# Altium footprint library FPC.PcbLib: 104 footprints (part 4 of 7)
Each footprint in its own frame and in the unit in brackets; x right, y up, seen from the top. Pads: shape width x height; smd on the part's side, far side on the other; paste and mask are expansions set on the pad; w line width, h text height; cw(c..) or ccw(c..) is an arc to the next point about the centre after c.
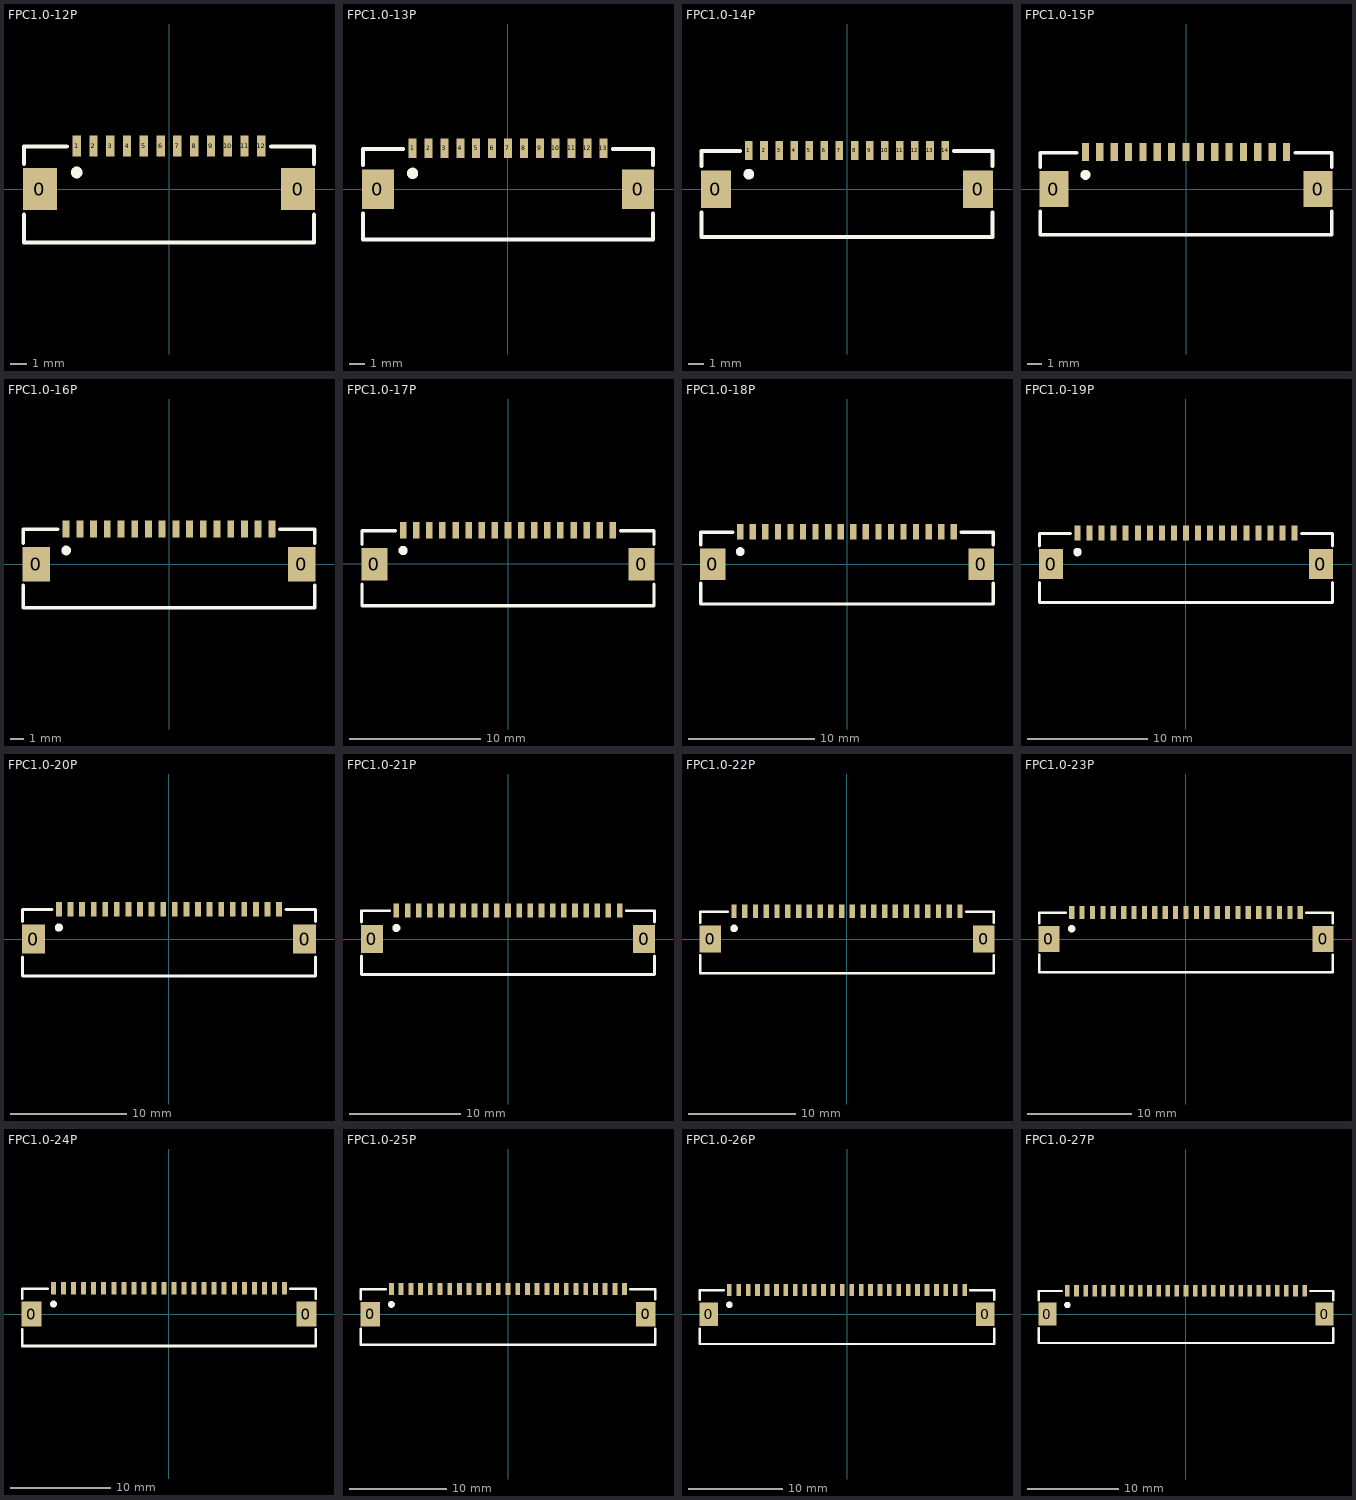
[diagram p3: the footprints below, top view; thin cyan lines are the x and y axes]

## FPC1.0-12P [mm]
pads (14):
  rect 2x2.5 smd: 0(-7.69,0) 0(7.69,0)
  rect 0.5x1.25 smd: 1(-5.5,2.575) 2(-4.5,2.575) 3(-3.5,2.575) 4(-2.5,2.575) 5(-1.5,2.575) 6(-0.5,2.575) 7(0.5,2.575) 8(1.5,2.575) 9(2.5,2.575) 10(3.5,2.575) 11(4.5,2.575) 12(5.5,2.575)
Top Overlay:
  circle w0.5: c-5.5,1 r0.1
  lines w0.254: -8.636,-1.524 -8.636,-3.175 8.636,-3.175 8.636,-1.524 ; -8.636,1.524 -8.636,2.54 -6.096,2.54 ; 6.096,2.54 8.636,2.54 8.636,1.524
3D body "FPC1.0-12P.STEP": height 2, standoff -0.01, extent -8.45,-3 8.45,3

## FPC1.0-13P [mm]
pads (15):
  rect 2x2.5 smd: 0(-8.19,0) 0(8.19,0)
  rect 0.5x1.25 smd: 1(-6,2.575) 2(-5,2.575) 3(-4,2.575) 4(-3,2.575) 5(-2,2.575) 6(-1,2.575) 7(0,2.575) 8(1,2.575) 9(2,2.575) 10(3,2.575) 11(4,2.575) 12(5,2.575) 13(6,2.575)
Top Overlay:
  circle w0.5: c-6,1 r0.1
  lines w0.254: -9.136,-1.524 -9.136,-3.175 9.136,-3.175 9.136,-1.524 ; -9.136,1.524 -9.136,2.54 -6.596,2.54 ; 6.596,2.54 9.136,2.54 9.136,1.524
3D body "FPC1.0-13P.STEP": height 2, standoff -0.01, extent -8.95,-3.175 8.95,2.825

## FPC1.0-14P [mm]
pads (16):
  rect 2x2.5 smd: 0(-8.69,0) 0(8.69,0)
  rect 0.5x1.25 smd: 1(-6.5,2.575) 2(-5.5,2.575) 3(-4.5,2.575) 4(-3.5,2.575) 5(-2.5,2.575) 6(-1.5,2.575) 7(-0.5,2.575) 8(0.5,2.575) 9(1.5,2.575) 10(2.5,2.575) 11(3.5,2.575) 12(4.5,2.575) 13(5.5,2.575) 14(6.5,2.575)
Top Overlay:
  circle w0.5: c-6.5,1 r0.1
  lines w0.254: -9.636,-1.524 -9.636,-3.175 9.636,-3.175 9.636,-1.524 ; -9.636,1.524 -9.636,2.54 -7.096,2.54 ; 7.096,2.54 9.636,2.54 9.636,1.524
3D body "FPC1.0-14P.STEP": height 2, standoff -0.01, extent -9.45,-3 9.45,3

## FPC1.0-15P [mm]
pads (17):
  rect 2x2.5 smd: 0(-9.19,0) 0(9.19,0)
  rect 0.5x1.25 smd: 1(-7,2.575) 2(-6,2.575) 3(-5,2.575) 4(-4,2.575) 5(-3,2.575) 6(-2,2.575) 7(-1,2.575) 8(0,2.575) 9(1,2.575) 10(2,2.575) 11(3,2.575) 12(4,2.575) 13(5,2.575) 14(6,2.575) 15(7,2.575)
Top Overlay:
  circle w0.5: c-7,1 r0.1
  lines w0.254: -10.136,-1.524 -10.136,-3.175 10.136,-3.175 10.136,-1.524 ; -10.136,1.524 -10.136,2.54 -7.596,2.54 ; 7.596,2.54 10.136,2.54 10.136,1.524
3D body "FPC1.0-15P.STEP": height 2, standoff -0.01, extent -9.95,-3 9.95,3

## FPC1.0-16P [mm]
pads (18):
  rect 2x2.5 smd: 0(-9.69,0) 0(9.69,0)
  rect 0.5x1.25 smd: 1(-7.5,2.575) 2(-6.5,2.575) 3(-5.5,2.575) 4(-4.5,2.575) 5(-3.5,2.575) 6(-2.5,2.575) 7(-1.5,2.575) 8(-0.5,2.575) 9(0.5,2.575) 10(1.5,2.575) 11(2.5,2.575) 12(3.5,2.575) 13(4.5,2.575) 14(5.5,2.575) 15(6.5,2.575) 16(7.5,2.575)
Top Overlay:
  circle w0.5: c-7.5,1 r0.1
  lines w0.254: -10.636,-1.524 -10.636,-3.175 10.634,-3.175 10.634,-1.524 ; -10.636,1.524 -10.636,2.54 -8.096,2.54 ; 8.094,2.54 10.634,2.54 10.634,1.524
3D body "FPC1.0-16P.STEP": height 2, standoff -0.01, extent -10.45,-3 10.45,3

## FPC1.0-17P [mm]
pads (19):
  rect 2x2.5 smd: 0(-10.19,-0.04) 0(10.19,-0.04)
  rect 0.5x1.25 smd: 1(-8,2.535) 2(-7,2.535) 3(-6,2.535) 4(-5,2.535) 5(-4,2.535) 6(-3,2.535) 7(-2,2.535) 8(-1,2.535) 9(0,2.535) 10(1,2.535) 11(2,2.535) 12(3,2.535) 13(4,2.535) 14(5,2.535) 15(6,2.535) 16(7,2.535) 17(8,2.535)
Top Overlay:
  circle w0.5: c-8,1 r0.1
  lines w0.254: -11.136,-1.564 -11.136,-3.215 11.134,-3.215 11.134,-1.564 ; -11.136,1.484 -11.136,2.5 -8.596,2.5 ; 8.594,2.5 11.134,2.5 11.134,1.484
3D body "FPC1.0-17P.STEP": height 2, standoff -0.01, extent -11,-3 10.9,3

## FPC1.0-18P [mm]
pads (20):
  rect 2x2.5 smd: 0(-10.69,0) 0(10.69,0)
  rect 0.5x1.25 smd: 1(-8.5,2.575) 2(-7.5,2.575) 3(-6.5,2.575) 4(-5.5,2.575) 5(-4.5,2.575) 6(-3.5,2.575) 7(-2.5,2.575) 8(-1.5,2.575) 9(-0.5,2.575) 10(0.5,2.575) 11(1.5,2.575) 12(2.5,2.575) 13(3.5,2.575) 14(4.5,2.575) 15(5.5,2.575) 16(6.5,2.575) 17(7.5,2.575) 18(8.5,2.575)
Top Overlay:
  circle w0.5: c-8.5,1 r0.1
  lines w0.254: -11.636,-1.524 -11.636,-3.175 11.634,-3.175 11.634,-1.524 ; -11.636,1.524 -11.636,2.54 -9.096,2.54 ; 9.094,2.54 11.634,2.54 11.634,1.524
3D body "FPC1.0-18P.STEP": height 2, standoff -0.01, extent -11.45,-3 11.45,3

## FPC1.0-19P [mm]
pads (21):
  rect 2x2.5 smd: 0(-11.19,0) 0(11.19,0)
  rect 0.5x1.25 smd: 1(-9,2.575) 2(-8,2.575) 3(-7,2.575) 4(-6,2.575) 5(-5,2.575) 6(-4,2.575) 7(-3,2.575) 8(-2,2.575) 9(-1,2.575) 10(0,2.575) 11(1,2.575) 12(2,2.575) 13(3,2.575) 14(4,2.575) 15(5,2.575) 16(6,2.575) 17(7,2.575) 18(8,2.575) 19(9,2.575)
Top Overlay:
  circle w0.5: c-9,1 r0.1
  lines w0.254: -12.136,-1.524 -12.136,-3.175 12.134,-3.175 12.134,-1.524 ; -12.136,1.524 -12.136,2.54 -9.596,2.54 ; 9.594,2.54 12.134,2.54 12.134,1.524
3D body "FPC1.0-19P.STEP": height 2, standoff -0.01, extent -11.95,-3 11.95,3

## FPC1.0-20P [mm]
pads (22):
  rect 2x2.5 smd: 0(-11.69,0) 0(11.69,0)
  rect 0.5x1.25 smd: 1(-9.5,2.575) 2(-8.5,2.575) 3(-7.5,2.575) 4(-6.5,2.575) 5(-5.5,2.575) 6(-4.5,2.575) 7(-3.5,2.575) 8(-2.5,2.575) 9(-1.5,2.575) 10(-0.5,2.575) 11(0.5,2.575) 12(1.5,2.575) 13(2.5,2.575) 14(3.5,2.575) 15(4.5,2.575) 16(5.5,2.575) 17(6.5,2.575) 18(7.5,2.575) 19(8.5,2.575) 20(9.5,2.575)
Top Overlay:
  circle w0.5: c-9.5,1 r0.1
  lines w0.254: -12.636,-1.524 -12.636,-3.175 12.634,-3.175 12.634,-1.524 ; -12.636,1.524 -12.636,2.54 -10.096,2.54 ; 10.094,2.54 12.634,2.54 12.634,1.524
3D body "FPC1.0-20P.STEP": height 2, standoff -0.01, extent -12.5,-3 12.4,3

## FPC1.0-21P [mm]
pads (23):
  rect 2x2.5 smd: 0(-12.19,0) 0(12.19,0)
  rect 0.5x1.25 smd: 1(-10,2.575) 2(-9,2.575) 3(-8,2.575) 4(-7,2.575) 5(-6,2.575) 6(-5,2.575) 7(-4,2.575) 8(-3,2.575) 9(-2,2.575) 10(-1,2.575) 11(0,2.575) 12(1,2.575) 13(2,2.575) 14(3,2.575) 15(4,2.575) 16(5,2.575) 17(6,2.575) 18(7,2.575) 19(8,2.575) 20(9,2.575) 21(10,2.575)
Top Overlay:
  circle w0.5: c-10,1 r0.1
  lines w0.254: -13.136,-1.524 -13.136,-3.175 13.134,-3.175 13.134,-1.524 ; -13.136,1.524 -13.136,2.54 -10.596,2.54 ; 10.594,2.54 13.134,2.54 13.134,1.524
3D body "FPC1.0-21P.STEP": height 2, standoff -0.01, extent -13,-3 12.9,3

## FPC1.0-22P [mm]
pads (24):
  rect 2x2.5 smd: 0(-12.69,0) 0(12.69,0)
  rect 0.5x1.25 smd: 1(-10.5,2.575) 2(-9.5,2.575) 3(-8.5,2.575) 4(-7.5,2.575) 5(-6.5,2.575) 6(-5.5,2.575) 7(-4.5,2.575) 8(-3.5,2.575) 9(-2.5,2.575) 10(-1.5,2.575) 11(-0.5,2.575) 12(0.5,2.575) 13(1.5,2.575) 14(2.5,2.575) 15(3.5,2.575) 16(4.5,2.575) 17(5.5,2.575) 18(6.5,2.575) 19(7.5,2.575) 20(8.5,2.575) 21(9.5,2.575) 22(10.5,2.575)
Top Overlay:
  circle w0.5: c-10.5,1 r0.1
  lines w0.254: -13.636,-1.524 -13.636,-3.175 13.634,-3.175 13.634,-1.524 ; -13.636,1.524 -13.636,2.54 -11.096,2.54 ; 11.094,2.54 13.634,2.54 13.634,1.524
3D body "FPC1.0-22P.STEP": height 2, standoff -0.01, extent -13.45,-3 13.45,3

## FPC1.0-23P [mm]
pads (25):
  rect 2x2.5 smd: 0(-13.19,0) 0(13.19,0)
  rect 0.5x1.25 smd: 1(-11,2.575) 2(-10,2.575) 3(-9,2.575) 4(-8,2.575) 5(-7,2.575) 6(-6,2.575) 7(-5,2.575) 8(-4,2.575) 9(-3,2.575) 10(-2,2.575) 11(-1,2.575) 12(0,2.575) 13(1,2.575) 14(2,2.575) 15(3,2.575) 16(4,2.575) 17(5,2.575) 18(6,2.575) 19(7,2.575) 20(8,2.575) 21(9,2.575) 22(10,2.575) 23(11,2.575)
Top Overlay:
  circle w0.5: c-11,1 r0.1
  lines w0.254: -14.136,-1.524 -14.136,-3.175 14.134,-3.175 14.134,-1.524 ; -14.136,1.524 -14.136,2.54 -11.596,2.54 ; 11.594,2.54 14.134,2.54 14.134,1.524
3D body "FPC1.0-23P.STEP": height 2, standoff -0.01, extent -13.95,-3 13.95,3

## FPC1.0-24P [mm]
pads (26):
  rect 2x2.5 smd: 0(-13.69,0) 0(13.69,0)
  rect 0.5x1.25 smd: 1(-11.5,2.575) 2(-10.5,2.575) 3(-9.5,2.575) 4(-8.5,2.575) 5(-7.5,2.575) 6(-6.5,2.575) 7(-5.5,2.575) 8(-4.5,2.575) 9(-3.5,2.575) 10(-2.5,2.575) 11(-1.5,2.575) 12(-0.5,2.575) 13(0.5,2.575) 14(1.5,2.575) 15(2.5,2.575) 16(3.5,2.575) 17(4.5,2.575) 18(5.5,2.575) 19(6.5,2.575) 20(7.5,2.575) 21(8.5,2.575) 22(9.5,2.575) 23(10.5,2.575) 24(11.5,2.575)
Top Overlay:
  circle w0.5: c-11.5,1 r0.1
  lines w0.254: -14.636,-1.524 -14.636,-3.175 14.634,-3.175 14.634,-1.524 ; -14.636,1.524 -14.636,2.54 -12.096,2.54 ; 12.094,2.54 14.634,2.54 14.634,1.524
3D body "FPC1.0-24P.STEP": height 2, standoff -0.01, extent -14.451,-3.175 14.449,2.825

## FPC1.0-25P [mm]
pads (27):
  rect 2x2.5 smd: 0(-14.19,0) 0(14.19,0)
  rect 0.5x1.25 smd: 1(-12,2.575) 2(-11,2.575) 3(-10,2.575) 4(-9,2.575) 5(-8,2.575) 6(-7,2.575) 7(-6,2.575) 8(-5,2.575) 9(-4,2.575) 10(-3,2.575) 11(-2,2.575) 12(-1,2.575) 13(0,2.575) 14(1,2.575) 15(2,2.575) 16(3,2.575) 17(4,2.575) 18(5,2.575) 19(6,2.575) 20(7,2.575) 21(8,2.575) 22(9,2.575) 23(10,2.575) 24(11,2.575) 25(12,2.575)
Top Overlay:
  circle w0.5: c-12,1 r0.1
  lines w0.254: -15.136,-1.524 -15.136,-3.175 15.134,-3.175 15.134,-1.524 ; -15.136,1.524 -15.136,2.54 -12.596,2.54 ; 12.594,2.54 15.134,2.54 15.134,1.524
3D body "FPC1.0-25P.STEP": height 2, standoff -0.01, extent -15,-3 14.9,3

## FPC1.0-26P [mm]
pads (28):
  rect 2x2.5 smd: 0(-14.69,0) 0(14.69,0)
  rect 0.5x1.25 smd: 1(-12.5,2.575) 2(-11.5,2.575) 3(-10.5,2.575) 4(-9.5,2.575) 5(-8.5,2.575) 6(-7.5,2.575) 7(-6.5,2.575) 8(-5.5,2.575) 9(-4.5,2.575) 10(-3.5,2.575) 11(-2.5,2.575) 12(-1.5,2.575) 13(-0.5,2.575) 14(0.5,2.575) 15(1.5,2.575) 16(2.5,2.575) 17(3.5,2.575) 18(4.5,2.575) 19(5.5,2.575) 20(6.5,2.575) 21(7.5,2.575) 22(8.5,2.575) 23(9.5,2.575) 24(10.5,2.575) 25(11.5,2.575) 26(12.5,2.575)
Top Overlay:
  circle w0.5: c-12.5,1 r0.1
  lines w0.254: -15.636,-1.524 -15.636,-3.175 15.634,-3.175 15.634,-1.524 ; -15.636,1.524 -15.636,2.54 -13.096,2.54 ; 13.094,2.54 15.634,2.54 15.634,1.524
3D body "FPC1.0-26P.STEP": height 2, standoff -0.01, extent -15.5,-3 15.4,3

## FPC1.0-27P [mm]
pads (29):
  rect 2x2.5 smd: 0(-15.19,0) 0(15.19,0)
  rect 0.5x1.25 smd: 1(-13,2.575) 2(-12,2.575) 3(-11,2.575) 4(-10,2.575) 5(-9,2.575) 6(-8,2.575) 7(-7,2.575) 8(-6,2.575) 9(-5,2.575) 10(-4,2.575) 11(-3,2.575) 12(-2,2.575) 13(-1,2.575) 14(0,2.575) 15(1,2.575) 16(2,2.575) 17(3,2.575) 18(4,2.575) 19(5,2.575) 20(6,2.575) 21(7,2.575) 22(8,2.575) 23(9,2.575) 24(10,2.575) 25(11,2.575) 26(12,2.575) 27(13,2.575)
Top Overlay:
  circle w0.5: c-13,1 r0.1
  lines w0.254: -16.136,-1.524 -16.136,-3.175 16.134,-3.175 16.134,-1.524 ; -16.136,1.524 -16.136,2.54 -13.596,2.54 ; 13.594,2.54 16.134,2.54 16.134,1.524
3D body "FPC1.0-27P.STEP": height 2, standoff -0.01, extent -16,-3 15.9,3